# Altium footprint library chipfc_libs.PCBLIB: 315 footprints (part 3 of 20)
Each footprint in its own frame and in the unit in brackets; x right, y up, seen from the top. Pads: shape width x height; smd on the part's side, far side on the other; paste and mask are expansions set on the pad; w line width, h text height; cw(c..) or ccw(c..) is an arc to the next point about the centre after c.
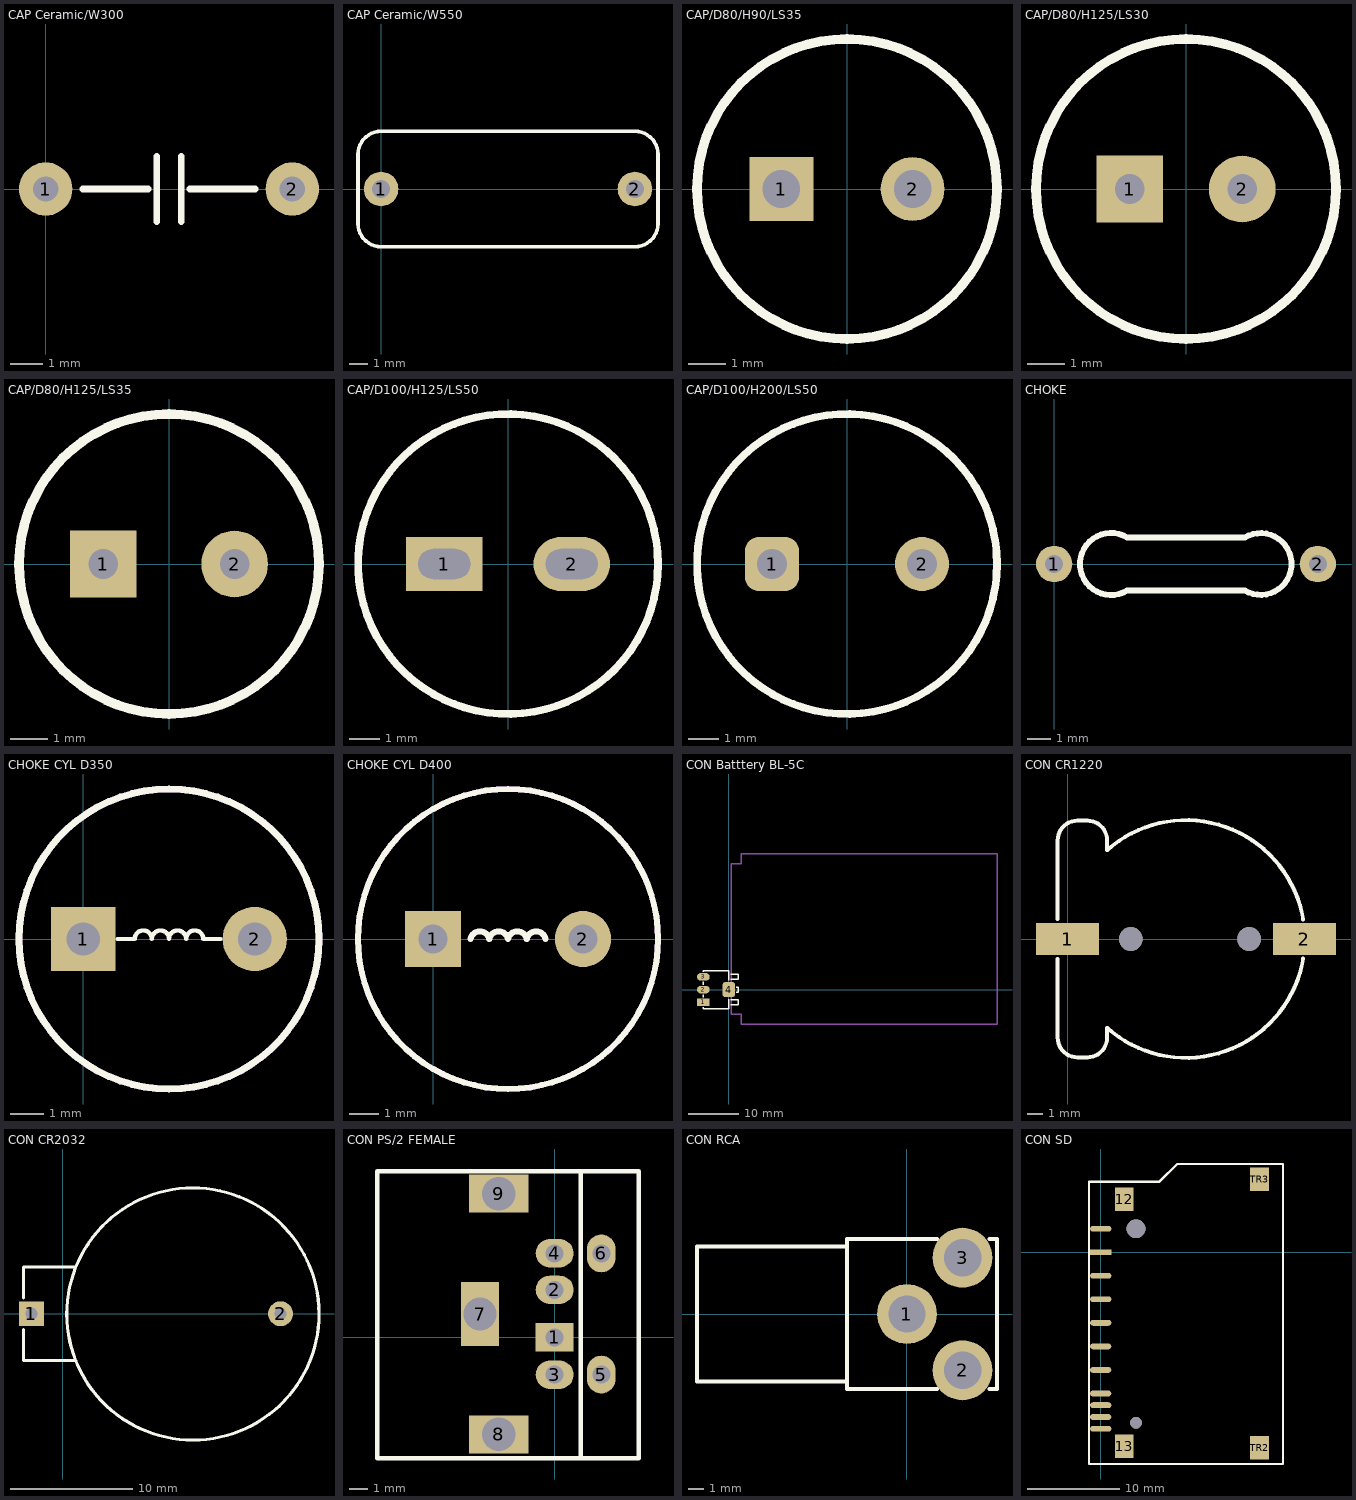
[diagram p2: the footprints below, top view; thin cyan lines are the x and y axes]

## CAP Ceramic/W300 [mil]
pads (2):
  round 65 hole 31: 1(0,0) 2(300,0)
Top Overlay:
  lines w8: 45,0 125,0 ; 135,-40 135,40 ; 165,-40 165,40 ; 175,0 255,0
3D body "User Library-Panasonic ECK-A3D102KBP.step": height 339.84, standoff -180, extent -7.5,-47.15 307.5,47.16

## CAP Ceramic/W550 [mil]
pads (2):
  round 75 hole 39: 1(0,0) 2(550,0)
Top Overlay:
  lines w8: -50,-75 ccw(c0,-75) 0,-125 550,-125 ccw(c550,-75) 600,-75 600,75 ccw(c550,75) 550,125 0,125 ccw(c0,75) -50,75 -50,-75

## CAP/D80/H90/LS35 [mm] "Dia 8mm, Heigh 12.5mm, Lead Space 3mm (4.7uF/400V small)"
pads (2):
  rect 1.7x1.7 hole 1: 1(-1.75,0)
  round 1.7 hole 1: 2(1.75,0)
Top Overlay:
  circle w0.254: c0,0 r4
3D body "User Library-NIC_NRE-L221M10V8X9 _220MF_6_3V_Radial_Minature_Capacitor.step": height 9.91, standoff -3.17, extent -4.128,-4.127 4.127,4.128

## CAP/D80/H125/LS30 [mil] "Dia 8mm, Heigh 12.5mm, Lead Space 3mm (4.7uF/400V small)"
pads (2):
  rect 70x70 hole 31: 1(-59.06,0)
  round 70 hole 31: 2(59.06,0)
Top Overlay:
  circle w10: c0,0 r157.48
3D body "User Library-CAP 8X11_5.STEP": height 454.24, standoff -746.06, extent -157.48,-157.48 157.48,157.48

## CAP/D80/H125/LS35 [mil] "Dia 8mm, Heigh 12.5mm, Lead Space 3.5mm (470uF/16V small)"
pads (2):
  rect 70x70 hole 31: 1(-68.9,0)
  round 70 hole 31: 2(68.9,0)
Top Overlay:
  circle w10: c0,0 r157.48
3D body "User Library-CAP 8X11_5.STEP": height 454.24, standoff -746.06, extent -157.48,-157.48 157.48,157.48

## CAP/D100/H125/LS50 [mm] "Dia 8mm, Heigh 12.5mm, Lead Space 3.5mm (470uF/16V small)"
pads (2):
  rect 2.55x1.8 hole 1 slot 1.75 at 0 deg: 1(-2.125,0)
  oval 2.55x1.8 hole 1 slot 1.75 at 0 deg: 2(2.125,0)
Top Overlay:
  circle w0.254: c0,0 r5
3D body "User Library-Cap electro 10x12_5x5_0mm.step": height 12.78, standoff -3.73, extent -5.025,-5.025 5.026,5.026

## CAP/D100/H200/LS50 [mm] "Dia 8mm, Heigh 12.5mm, Lead Space 3.5mm (470uF/16V small)"
pads (2):
  rrect50% 1.8x1.8 hole 1: 1(-2.5,0)
  round 1.8 hole 1: 2(2.5,0)
Top Overlay:
  circle w0.254: c0,0 r5
3D body "User Library-Cap-EL(10x20-5).step": height 20, standoff -3.3, extent -5,-5 5.002,5

## CHOKE [mil]
pads (2):
  round 62 / inner round 52 / far side round 62 hole 31: 1(0,0) 2(450,0)
Top Overlay:
  lines w10: 125,-45 cw(c97.03,0) 125,45 325,45 cw(c352.35,0) 325,-45 125,-45

## CHOKE CYL D350 [mil]
pads (2):
  rect 75x75 hole 39: 1(0,0)
  round 75 hole 39: 2(200,0)
Top Overlay:
  lines w5: 40,0 50,0 60,0 cw(c70,0) 80,0 cw(c90,0) 100,0 cw(c110,0) 120,0 cw(c130,0) 140,0 150,0 160,0
  lines w8: -75,0 ccw(c100,0) 100,-175 ccw(c100,0) 275,0 ccw(c100,0) 100,175 ccw(c100,0) -75,0
Mechanical 1:
  lines w8: -75,0 cw(c100,0) 100,175 cw(c100,0) 275,0 cw(c100,0) 100,-175 cw(c100,0) -75,0

## CHOKE CYL D400 [mil]
pads (2):
  rect 75x75 / inner round 60 / far side rect 75x75 hole 39: 1(0,0)
  round 75 / inner round 60 / far side round 75 hole 39: 2(200,0)
Top Overlay:
  lines w8: 50,0 cw(c62.5,-2.5) 75,0 cw(c87.5,-2.5) 100,0 cw(c112.5,-2.5) 125,0 cw(c137.5,-2.5) 150,0 ; -100,0 cw(c100,0) 100,200 cw(c100,0) 300,0 cw(c100,0) 100,-200 cw(c100,0) -100,0
Mechanical 1:
  lines w8: -100,0 ccw(c100,0) 100,-200 ccw(c100,0) 300,0 ccw(c100,0) 100,200 ccw(c100,0) -100,0

## CON Batttery BL-5C [mil]
pads (4):
  rect 100x60 smd: 1(-200,-100)
  oval 100x60 smd: 2(-200,0) 3(-200,100)
  rrect50% 100x120 smd: 4(0,0)
Top Overlay:
  lines w10: -200,-140 -200,-150 0,-150 0,-75 ; -200,-60 -200,-40 ; -200,40 -200,60 ; -200,140 -200,150 0,150 0,75 ; 15,-120 75,-120 75,-80 15,-80 ; 15,80 75,80 75,120 15,120 ; 60,-20 75,-20 75,20 60,20
Mechanical 1:
  lines w10: 19.69,-193.11 98.43,-193.11 98.43,-271.85 2106.3,-271.85 2106.3,1066.73 98.43,1066.73 98.43,987.99 19.69,987.99 19.69,-193.11

## CON CR1220 [mil]
height 393.7
pads (4):
  rect 160x80 smd: 1(0,0) 2(600,0)
  round 60 hole 60 unplated: ""(160,0) ""(460,0)
Top Overlay:
  lines w10: -25,-50 -25,-250 ccw(c25,-250) 25,-300 50,-300 ccw(c50,-250) 100,-250 100,-225 ccw(c300,0) 596.94,-49.49 ; -25,50 -25,250 cw(c25,250) 25,300 50,300 cw(c50,250) 100,250 100,225 cw(c300,0) 596.94,49.49
3D body "User Library-cr1220.STEP": height 159.49, standoff -35, extent -64.17,-295.43 664.17,295

## CON CR2032 [mil]
height 393.7
pads (2):
  rect 80x80 / inner round 60 / far side rect 80x80 hole 39: 1(-100,0)
  round 80 / inner round 60 / far side round 80 hole 39: 2(700,0)
Top Overlay:
  lines w10: -125,-50 -125,-150 40,-150 ; -125,50 -125,150 40,150 ; 823.4,-0.8 cw(c418.4,-0.8) 823.4,-0.09
3D body "User Library-CR 2032 (Battery Holder)-1.step": height 278.5, standoff -136.85, extent -232.09,-447.83 897.83,447.83

## CON PS/2 FEMALE [mil]
pads (9):
  rect 80x60 / inner rect 90x65 / far side rect 80x60 hole 38: 1(0,0)
  oval 80x60 hole 38: 2(0,100) 3(0,-78.67) 4(0,177)
  oval 60x80 hole 38: 5(98.33,-78.67) 6(98.33,177)
  rect 80x135 / inner round 60 / far side rect 80x135 hole 70: 7(-157.33,49.17)
  rect 125x80 / inner round 60 / far side rect 125x80 hole 70: 8(-118,-204.53) 9(-118,302.87)
Top Overlay:
  lines w10: 55,-250 55,350 ; -373.98,-255 177.15,-255 177.15,350 -373.98,350 -373.98,-255

## CON RCA [mm]
pads (3):
  round 4 / inner round 1.524 / far side round 4 hole 2.499: 1(0,0) 2(3.7,-3.75) 3(3.7,3.75)
Top Overlay:
  lines w0.254: -4,-4.5 -14,-4.5 -14,4.5 -4,4.5 ; 2,-5 -4,-5 -4,5 2,5 ; 5.5,-5 6,-5 6,5 5.5,5

## CON SD [mil]
pads (17):
  rect 90x25 smd: 1(0,0)
  oval 90x25 smd: 2(0,-100) 3(0,-200) 4(0,-300) 5(0,-400) 6(0,-500) 7(0,-600) 8(0,-650) 9(0,100) 10(0,-700) 11(0,-750)
  rect 80x100 smd: 12(100,225) 13(100,-825) TR2(675,-830) TR3(675,310)
  round 80 hole 80: HOLD1(150,100)
  round 50 hole 50: HOLD2(150,-725)
Top Overlay:
  lines w10: -50,-900 -50,300 250,300 325,375 775,375 775,-900 -50,-900